# Altium footprint library Mov.PcbLib: 4 footprints
Each footprint in its own frame and in the unit in brackets; x right, y up, seen from the top. Pads: shape width x height; smd on the part's side, far side on the other; paste and mask are expansions set on the pad; w line width, h text height; cw(c..) or ccw(c..) is an arc to the next point about the centre after c.
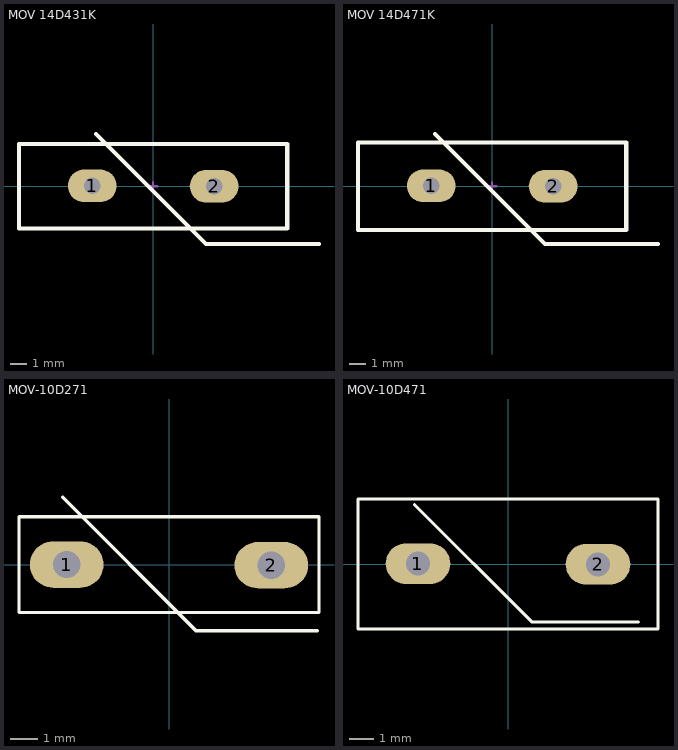
[diagram p0: the footprints below, top view; thin cyan lines are the x and y axes]

## MOV 14D431K [mm] "20 * 4.6 mm H*T"
pads (2):
  oval 3x2 hole 1: 1(-3.75,0.013) 2(3.75,-0.012)
Top Overlay:
  lines w0.254: -3.503,3.189 3.242,-3.556 10.2,-3.556 ; -8.25,-2.612 8.25,-2.612 8.25,2.588 -8.25,2.588 -8.25,-2.612
Top Designator:
  text ".Designator" at -2.735,-0.527 h1.52
Mechanical 15:
  lines w0.127: -0.254,-0.012 0.254,-0.012 ; 0,-0.266 0,0.242
3D body "Tantalio.STEP": height 9.14, standoff -1.05, extent -4,-1.165 4.001,1.225

## MOV 14D471K [mm] "16.5*5.4*20"
pads (2):
  oval 3x2 hole 1: 1(-3.75,0.013) 2(3.75,-0.012)
Top Overlay:
  lines w0.254: -3.503,3.189 3.242,-3.556 10.2,-3.556 ; -8.25,-2.712 -8.25,2.688 8.25,2.688 8.25,-2.712 -8.25,-2.712
Top Designator:
  text ".Designator" at -2.735,-0.527 h1.52
Mechanical 15:
  lines w0.127: -0.254,-0.012 0.254,-0.012 ; 0,-0.266 0,0.242
3D body: height 17.25, standoff 0.75, extent -8.25,-2.712 8.25,2.688
3D body "Tantalio.STEP": height 9.14, standoff -1.05, extent -4,-1.165 4.001,1.225

## MOV-10D271 [mm] "Tu chong set"
pads (2):
  oval 2.7x1.7 hole 1: 1(-3.75,0.013) 2(3.75,-0.012)
Top Overlay:
  lines w0.127: -3.901,2.478 0.989,-2.412 5.434,-2.412 ; -5.498,-1.745 -5.498,1.77 5.498,1.77 5.498,-1.745 -5.498,-1.745
Top Designator:
  text ".Designator" at -3.71,-0.311 h1.52
3D body "Tantalio.STEP": height 9.14, standoff -1.05, extent -4,-1.165 4,1.225

## MOV-10D471 [mm] "Tu chong set"
pads (2):
  oval 2.7x1.7 hole 1: 1(-3.75,0.013) 2(3.75,-0.012)
Top Overlay:
  lines w0.127: -3.901,2.478 0.989,-2.412 5.434,-2.412 ; -6.25,-2.7 6.25,-2.7 6.25,2.7 -6.25,2.7 -6.25,-2.7
Top Designator:
  text ".Designator" at -3.71,-0.344 h1.52
3D body "Tantalio.STEP": height 9.14, standoff -1.05, extent -4,-1.165 4.001,1.225